# Altium schematic symbol library 2030-15-SM-RPLF.SchLib: 1 symbol
Pins are listed as number, name and electrical type; pins without a type are passive.

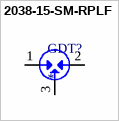
[diagram p0: symbol 2038-15-SM-RPLF]

## 2038-15-SM-RPLF
designator GDT?
Gas Tube, 3 Electr, 150V, 10kA, 5 mm, SMT, Reel pack, 2038 Series | Bourns 2038-15-SM-RPLF; MP: 2031-42T-SM-RPLF; SnapEDA_Link: https://www.snapeda.com/parts/2031-42T-SM-RPLF/Bourns/view-part/?ref=snap; Package: None; Value: *; MF: Bourns; Check_prices: https://www.snapeda.com/parts/2031-42T-SM-RPLF/Bourns/view-part/?ref=eda
footprint TVS_2031-42T-SM-RPLF
pins: 1, 2, 3